# EAGLE library part SC8815 (library SC8815)
SC8815 High Efficiency, Synchronous, Bi-Directional Buck-Boost Charger Controller with I2C Interface Source: Datasheet <https://datasheet.lcsc.com/lcsc/2006221513_Southchip-Semicon-SC8815QDER_C429908.pdf>
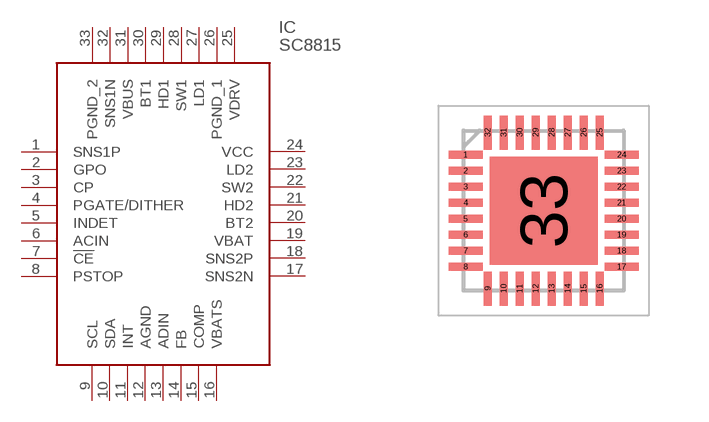
[diagram p0: symbol with the pads of QFN40P400X400X80-33N; footprint QFN40P400X400X80-33N]

Designator prefix IC

## SC8815 (Description: SC8815 High Efficiency, Synchronous, Bi-Directional Buck-Boost Charger Controller with I2C Interface; Height: 0.8mm; Manufacturer_Name: Southchip; Manufacturer_Part_Number: SC8815)  [QFN40P400X400X80-33N]
1  SNS1P
2  GPO
3  CP
4  PGATE/DITHER
5  INDET
6  ACIN
7  !CE
8  PSTOP
9  SCL
10  SDA
11  INT
12  AGND
13  ADIN
14  FB
15  COMP
16  VBATS
17  SNS2N
18  SNS2P
19  VBAT
20  BT2
21  HD2
22  SW2
23  LD2
24  VCC
25  VDRV
26  PGND_1
27  LD1
28  SW1
29  HD1
30  BT1
31  VBUS
32  SNS1N
33  PGND_2

## Footprint QFN40P400X400X80-33N (pad centres in mm)
QFN32L(0404x0.75-0.40)
smd 0.85 x 0.2: 1 -1.95,1.4; 2 -1.95,1; 3 -1.95,0.6; 4 -1.95,0.2; 5 -1.95,-0.2; 6 -1.95,-0.6; 7 -1.95,-1; 8 -1.95,-1.4; 17 1.95,-1.4; 18 1.95,-1; 19 1.95,-0.6; 20 1.95,-0.2; 21 1.95,0.2; 22 1.95,0.6; 23 1.95,1; 24 1.95,1.4
smd 0.2 x 0.85: 9 -1.4,-1.95; 10 -1,-1.95; 11 -0.6,-1.95; 12 -0.2,-1.95; 13 0.2,-1.95; 14 0.6,-1.95; 15 1,-1.95; 16 1.4,-1.95; 25 1.4,1.95; 26 1,1.95; 27 0.6,1.95; 28 0.2,1.95; 29 -0.2,1.95; 30 -0.6,1.95; 31 -1,1.95; 32 -1.4,1.95
smd 2.7 x 2.7: 33 0,0